# Altium schematic symbol library TCA4307DGKR.SchLib: 1 symbol
Pins are listed as number, name and electrical type; pins without a type are passive.

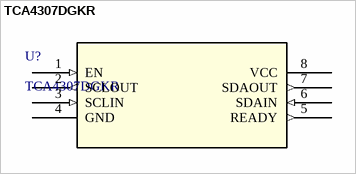
[diagram p0: symbol TCA4307DGKR]

## TCA4307DGKR
designator U?
2-bit bidirectional 2.3-V to 5.5-V, hot-swappable 400-kHz I<sup>2</sup>C/SMBus buffer with stuck- 8-VSSOP -40 to 125; Manufacturer_Name: Texas Instruments; Copyright: Copyright (C) 2026 Ultra Librarian. All rights reserved.; Manufacturer_Part_Number: TCA4307DGKR; RefDes: RefDes; Type: Type
footprint SOIC8_DGK_TEX
pins: 1 EN (in), 2 SCLOUT (out), 3 SCLIN (in), 4 GND (power), 5 READY (out), 6 SDAIN (in), 7 SDAOUT (out), 8 VCC (power)